# EAGLE library part 6101XX249221_610126249221 (library WR-PHD)
WR-PHD 2.54 mm PCB Socket Header - SMT Type - Double Row - Right Angle ARTICLE PROPERTIES: Pins:6;​ 8;​ 10;​ 12;​ 14;​ 16;​ 20;​ 22;​ 24;​ 26 KIND PROPERTIES: Pitch：2.54 mm Quality Class:3 as per CECC 75 301-802 Rows：Dual Gender：Socket Header Type：Angled MATERIAL PROPERTIES: Insulator Material :PA6T Insulator Flammability Rating:UL94 V-0 Contact Material:Copper Alloy Contact Plating:Gold Contact Type:Stamped GENERAL INFORMATION Operating Temperature:-40 up to +105 °C Compliance:Lead free / RoHS ELECTRICAL PROPERTIES: Rated Current:3 A IR 1:3 A Withstanding Voltage:600 V (AC) Contact Resistance:20 mΩ RISO:1000 MΩ CERTIFICATION UL Approval:E323964 PACKAGING PROPERTIES Packaging:Tape and Reel <https://katalog.we-online.com/media/images/v2/o33204v209%20Family_WR-PHD_6101_xx249221.jpg> Details see: https://katalog.we-online.com/en/em/PHD_2_54_SMT_DOUBLE_ROW_RIGHT_ANGLE_PCB_SOCKET_HEADER_6101XX249221 Updated by Yingchun,Shan 2019-10-24 2019 (C) Würth Elektronik
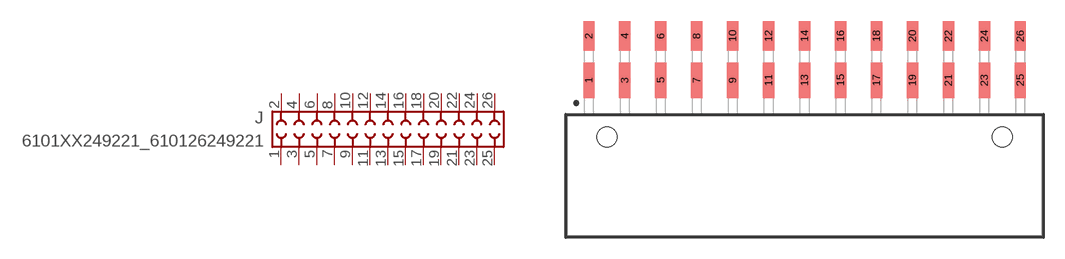
[diagram p290: symbol with the pads of 610126249221; footprint 610126249221]

Designator prefix J

## 6101XX249221_610126249221 (DATASHEET-URL: https://www.we-online.com/redexpert/spec/610126249221?ae; GENDER: Socket Header; IR: 3A; MOUNT: SMT; PACKAGING: Tape and Reel; PART-NUMBER: 610126249221; PINS: 26; PITCH: 2.54 mm; ROWS: Dual; TYPE: Angled; VALUE: 610126249221)  [610126249221]
1  1  pas
2  2  pas
3  3  pas
4  4  pas
5  5  pas
6  6  pas
7  7  pas
8  8  pas
9  9  pas
10  10  pas
11  11  pas
12  12  pas
13  13  pas
14  14  pas
15  15  pas
16  16  pas
17  17  pas
18  18  pas
19  19  pas
20  20  pas
21  21  pas
22  22  pas
23  23  pas
24  24  pas
25  25  pas
26  26  pas

## Footprint 610126249221 (pad centres in mm)
WR-PHD 2.54 mm PCB Socket Header - SMT Type - Double Row - Right Angle, 26 pins
smd 0.8 x 2.5: 1 -15.24,6.76; 3 -12.7,6.76; 5 -10.16,6.76; 7 -7.62,6.76; 9 -5.08,6.76; 11 -2.54,6.76; 13 0,6.76; 15 2.54,6.76; 17 5.08,6.76; 19 7.62,6.76; 21 10.16,6.76; 23 12.7,6.76; 25 15.24,6.76
smd 0.8 x 2.1: 2 -15.24,9.89; 4 -12.7,9.89; 6 -10.16,9.89; 8 -7.62,9.89; 10 -5.08,9.89; 12 -2.54,9.89; 14 0,9.89; 16 2.54,9.89; 18 5.08,9.89; 20 7.62,9.89; 22 10.16,9.89; 24 12.7,9.89; 26 15.24,9.89
hole 1.4 at -13.97,2.75
hole 1.4 at 13.97,2.75